# Altium footprint library Connector_SMD.PcbLib: 116 footprints (part 7 of 8)
Each footprint in its own frame and in the unit in brackets; x right, y up, seen from the top. Pads: shape width x height; smd on the part's side, far side on the other; paste and mask are expansions set on the pad; w line width, h text height; cw(c..) or ccw(c..) is an arc to the next point about the centre after c.
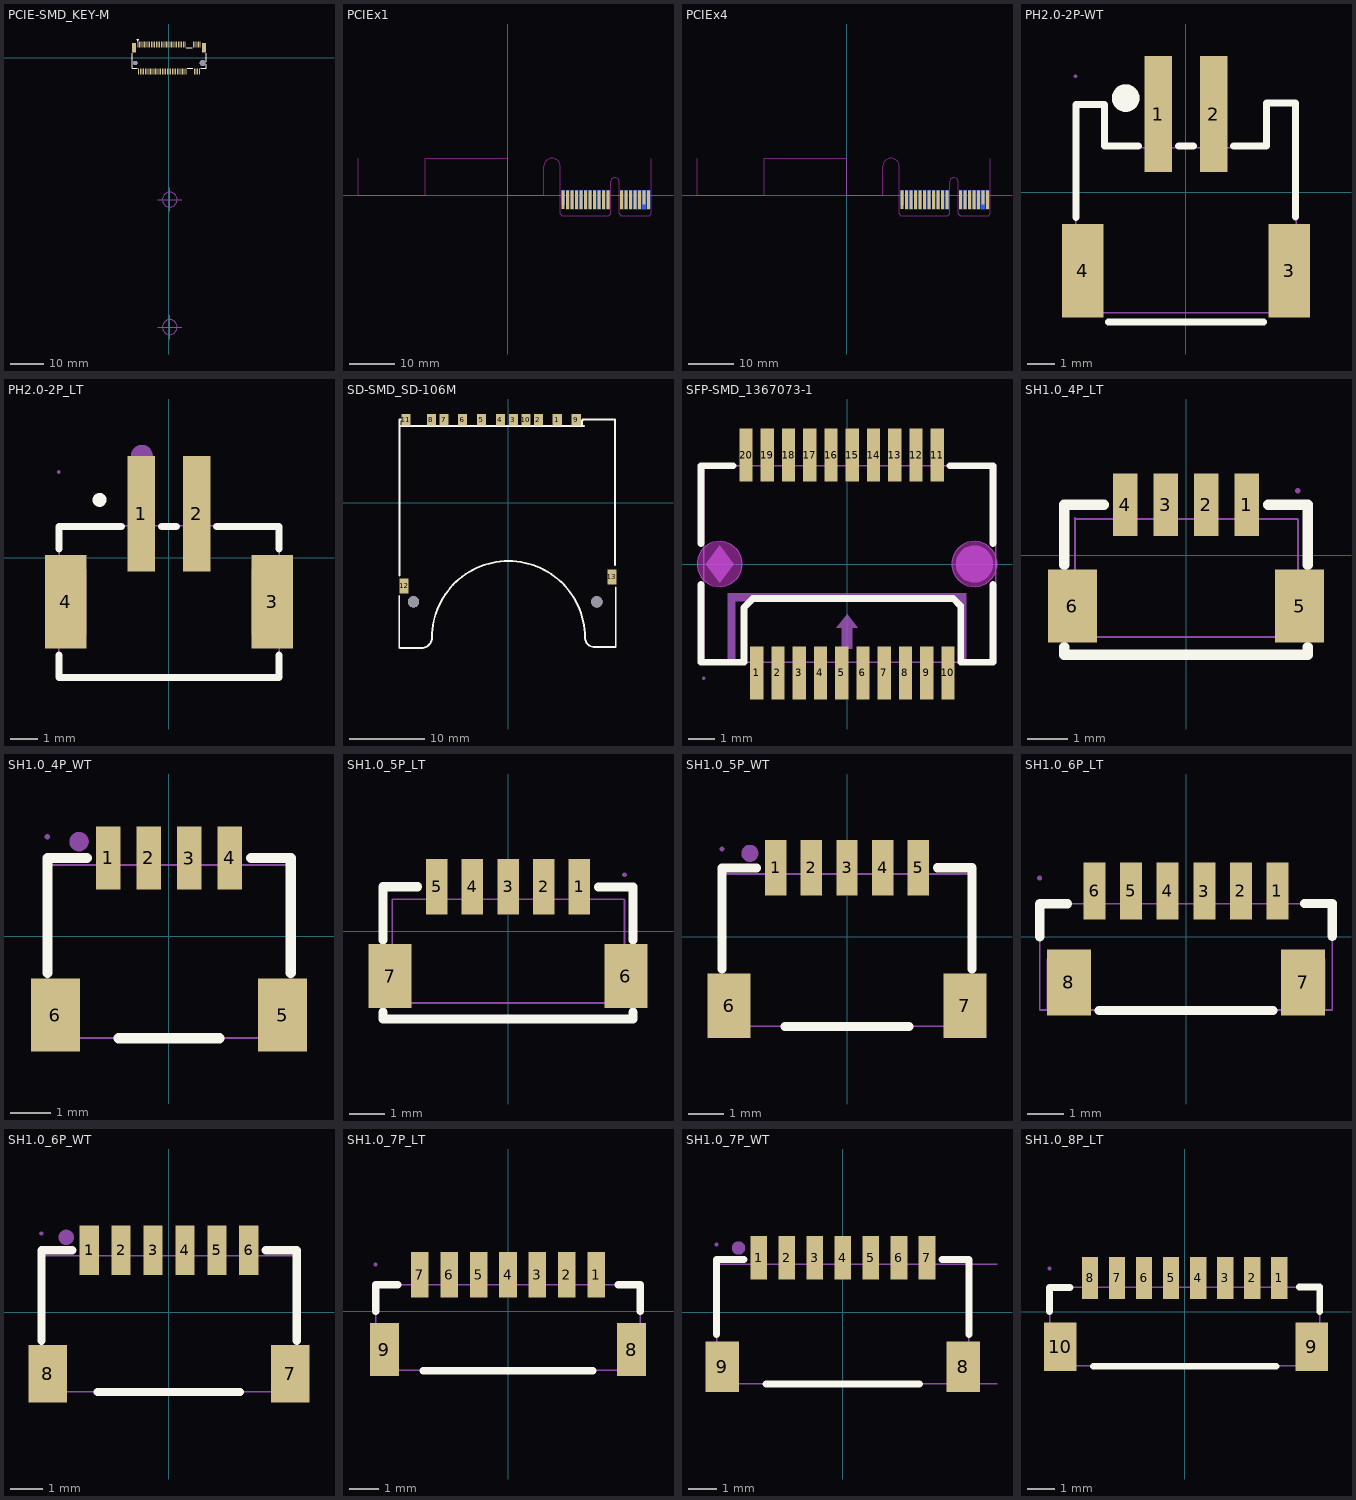
[diagram p6: the footprints below, top view; thin cyan lines are the x and y axes]

## PCIE-SMD_KEY-M [mm]
pads (71):
  rect 0.3x1.8 smd: 1(-9.25,4) 2(-9,-4) 3(-8.75,4) 4(-8.5,-4) 5(-8.25,4) 6(-8,-4) 7(-7.75,4) 8(-7.5,-4) 9(-7.25,4) 10(-7,-4) 11(-6.75,4) 12(-6.5,-4) 13(-6.25,4) 14(-6,-4) 15(-5.75,4) 16(-5.5,-4) 17(-5.25,4) 18(-5,-4) 19(-4.75,4) 20(-4.5,-4) 21(-4.25,4) 22(-4,-4) 23(-3.75,4) 24(-3.5,-4) 25(-3.25,4) 26(-3,-4) 27(-2.75,4) 28(-2.5,-4) 29(-2.25,4) 30(-2,-4) 31(-1.75,4) 32(-1.5,-4) 33(-1.25,4) 34(-1,-4) 35(-0.75,4) 36(-0.5,-4) 37(-0.25,4) 38(0,-4) 39(0.25,4) 40(0.5,-4) 41(0.75,4) 42(1,-4) 43(1.25,4) 44(1.5,-4) 45(1.75,4) 46(2,-4) 47(2.25,4) 48(2.5,-4) 49(2.75,4) 50(3,-4) 51(3.25,4) 52(3.5,-4) 53(3.75,4) 54(4,-4) 55(4.25,4) 56(4.5,-4) 57(4.75,4) 58(5,-4) 67(7.25,4) 68(7.5,-4) 69(7.75,4) 70(8,-4) 71(8.25,4) 72(8.5,-4) 73(8.75,4) 74(9,-4) 75(9.25,4)
  rect 1.2x2.75 smd: SH1(-10.35,3.005) SH2(10.35,3.005)
  round 1.3 hole 1.3 unplated: ""(-10,-1.495)
  round 1.8 hole 1.8 unplated: ""(10,-1.495)
Top Overlay:
  region: -9,5.63 -9.5,5.63 -9.25,4.755
  lines w0.254: -10.95,1.399 -10.95,-3 -9.381,-3 ; 5.131,3 6.869,3 ; 5.381,-3 7.119,-3 ; 9.381,-3 11,-3 11,-1.932 ; 11,-1.058 11,1.404
Mechanical 3:
  circle w0.2: c0.223,-42 r2.209
  circle w0.2: c0.223,-79.838 r2.209
  lines w0.2: -3.298,-79.838 0.223,-79.838 ; -3.298,-42 0.223,-42 ; 0.223,-83.359 0.223,-79.838 ; 0.223,-76.318 0.223,-79.838 ; 0.223,-45.52 0.223,-42 ; 0.223,-38.48 0.223,-42 ; 3.743,-79.838 0.223,-79.838 ; 3.743,-42 0.223,-42
3D body "3D_PCB1_2022-04-16.stp": height 4, standoff -0.6, extent -10.925,-4.075 10.925,4.075

## PCIEx1 [mm]
pads (36):
  rect 0.7x3.2 smd far side mask+0.102: A1(12.3,-0.483)
  rect 0.7x4.2 smd far side mask+0.102: A2(13.3,-0.983) A3(14.3,-0.983) A4(15.3,-0.983) A5(16.3,-0.983) A6(17.3,-0.983) A7(18.3,-0.983) A8(19.3,-0.983) A9(20.3,-0.983) A10(21.3,-0.983) A11(22.3,-0.983) A12(25.3,-0.983) A13(26.3,-0.983) A14(27.3,-0.983) A15(28.3,-0.983) A16(29.3,-0.983) A17(30.3,-0.983) A18(31.3,-0.983)
  rect 0.7x4.2 smd mask+0.102: B1(12.3,-0.983) B2(13.3,-0.983) B3(14.3,-0.983) B4(15.3,-0.983) B5(16.3,-0.983) B6(17.3,-0.983) B7(18.3,-0.983) B8(19.3,-0.983) B9(20.3,-0.983) B10(21.3,-0.983) B11(22.3,-0.983) B12(25.3,-0.983) B13(26.3,-0.983) B14(27.3,-0.983) B15(28.3,-0.983) B16(29.3,-0.983) B18(31.3,-0.983)
  rect 0.7x3.2 smd mask+0.102: B17(30.3,-0.483)
Top Solder:
  region: 11.497,-5.439 32.274,-5.439 32.274,1.267 11.497,1.267
  region: -0.297,-1.019 8.398,-1.019 8.398,2.867 -0.297,2.867
Bottom Solder:
  region: -0.297,-1.019 8.398,-1.019 8.398,2.867 -0.297,2.867
  region: 11.497,-5.439 32.274,-5.439 32.274,1.267 11.497,1.267
Keep-Out Layer:
  lines w0.2: -33.344,0 -33.344,8.25 -33.344,0 ; -33.344,0 -18.344,0 ; -33.344,0 -18.344,0 ; -18.344,0 -18.344,8.25 ; -18.344,0 -18.344,8.25 ; -18.344,8.25 0,8.25 ; -18.344,8.25 0,8.25 ; 0,0 0,8.25 ; 0,0 0,8.25 ; 0,0 8,0 ; 0,0 8,0 ; 8,0 8,6.431 ; 8,0 8,6.431 ; 8,6.431 cw(c9.825,6.431) 11.65,6.431 ; 8,6.431 cw(c9.825,6.431) 11.65,6.431 ; 11.65,-4.132 11.65,6.431 ; 11.65,-4.132 11.65,6.431 ; 11.65,-4.132 12.006,-4.488 11.65,-4.132 ; 22.85,-4.132 22.85,2.97 ; 22.85,-4.132 22.85,2.97 ; 22.85,-4.132 22.494,-4.488 22.85,-4.132 ; 22.85,2.97 cw(c23.8,2.97) 24.75,2.97 ; 22.85,2.97 cw(c23.8,2.97) 24.75,2.97 ; 24.75,-4.129 24.75,2.97 ; 24.75,-4.129 24.75,2.97 ; 24.75,-4.129 25.106,-4.485 24.75,-4.129 ; 31.95,-4.132 31.594,-4.488 31.95,-4.132 ; 31.95,-4.132 31.95,8.118 31.95,-4.132 ; 12.012,-4.5 22.494,-4.5 12.012,-4.5 ; 25.108,-4.5 31.594,-4.5 25.108,-4.5

## PCIEx4 [mm]
pads (36):
  rect 0.7x3.2 smd far side mask+0.102: A1(12.3,-0.483)
  rect 0.7x4.2 smd far side mask+0.102: A2(13.3,-0.983) A3(14.3,-0.983) A4(15.3,-0.983) A5(16.3,-0.983) A6(17.3,-0.983) A7(18.3,-0.983) A8(19.3,-0.983) A9(20.3,-0.983) A10(21.3,-0.983) A11(22.3,-0.983) A12(25.3,-0.983) A13(26.3,-0.983) A14(27.3,-0.983) A15(28.3,-0.983) A16(29.3,-0.983) A17(30.3,-0.983) A18(31.3,-0.983)
  rect 0.7x4.2 smd mask+0.102: B1(12.3,-0.983) B2(13.3,-0.983) B3(14.3,-0.983) B4(15.3,-0.983) B5(16.3,-0.983) B6(17.3,-0.983) B7(18.3,-0.983) B8(19.3,-0.983) B9(20.3,-0.983) B10(21.3,-0.983) B11(22.3,-0.983) B12(25.3,-0.983) B13(26.3,-0.983) B14(27.3,-0.983) B15(28.3,-0.983) B16(29.3,-0.983) B18(31.3,-0.983)
  rect 0.7x3.2 smd mask+0.102: B17(30.3,-0.483)
Top Solder:
  region: 11.497,-5.439 32.274,-5.439 32.274,1.267 11.497,1.267
  region: -0.297,-1.019 8.398,-1.019 8.398,2.867 -0.297,2.867
Bottom Solder:
  region: -0.297,-1.019 8.398,-1.019 8.398,2.867 -0.297,2.867
  region: 11.497,-5.439 32.274,-5.439 32.274,1.267 11.497,1.267
Keep-Out Layer:
  lines w0.2: -33.344,0 -33.344,8.25 -33.344,0 ; -33.344,0 -18.344,0 ; -33.344,0 -18.344,0 ; -18.344,0 -18.344,8.25 ; -18.344,0 -18.344,8.25 ; -18.344,8.25 0,8.25 ; -18.344,8.25 0,8.25 ; 0,0 0,8.25 ; 0,0 0,8.25 ; 0,0 8,0 ; 0,0 8,0 ; 8,0 8,6.431 ; 8,0 8,6.431 ; 8,6.431 cw(c9.825,6.431) 11.65,6.431 ; 8,6.431 cw(c9.825,6.431) 11.65,6.431 ; 11.65,-4.132 11.65,6.431 ; 11.65,-4.132 11.65,6.431 ; 11.65,-4.132 12.006,-4.488 11.65,-4.132 ; 22.85,-4.132 22.85,2.97 ; 22.85,-4.132 22.85,2.97 ; 22.85,-4.132 22.494,-4.488 22.85,-4.132 ; 22.85,2.97 cw(c23.8,2.97) 24.75,2.97 ; 22.85,2.97 cw(c23.8,2.97) 24.75,2.97 ; 24.75,-4.129 24.75,2.97 ; 24.75,-4.129 24.75,2.97 ; 24.75,-4.129 25.106,-4.485 24.75,-4.129 ; 31.95,-4.132 31.594,-4.488 31.95,-4.132 ; 31.95,-4.132 31.95,8.118 31.95,-4.132 ; 12.012,-4.5 22.494,-4.5 12.012,-4.5 ; 25.108,-4.5 31.594,-4.5 25.108,-4.5

## PH2.0-2P-WT [mm]
pads (4):
  rect 1x4.2 smd mask+0.05: 1(-1,2.85) 2(1,2.85)
  rect 1.5x3.4 smd mask+0.05: 3(3.75,-2.85) 4(-3.75,-2.85)
Top Overlay:
  circle w0.5: c-2.191,3.429 r0.25
  lines w0.254: -4,-0.919 -4,2.9 -4,3.2 -3.98,3.2 -2.97,3.2 -2.97,1.68 -1.731,1.68 ; -2.825,-4.7 2.825,-4.7 ; -0.269,1.68 0.269,1.68 ; 1.731,1.68 2.92,1.68 2.92,3.25 3.97,3.25 3.97,-0.896
Mechanical 6:
  circle w0.5: c-2.191,3.429 r0.25
Mechanical 15:
  region: -4,-1.6 -3.5,-1.6 -3.5,-4.1 -4,-4.1
  region: 3.5,-1.6 4,-1.6 4,-4.1 3.5,-4.1
  region: -1.25,4.22 -0.75,4.22 -0.75,1.22 -1.25,1.22
  region: 0.75,4.22 1.25,4.22 1.25,1.22 0.75,1.22
  region: -3.95,4.22 -3.95,4.245 -3.985,4.28 -4.035,4.28 -4.07,4.245 -4.07,4.22 -4.07,4.195 -4.035,4.16 -3.985,4.16 -3.95,4.195 -3.95,4.22
  lines w0.051: -4.01,-4.37 4,-4.37 4,3.23 3,3.23 3,1.63 -3,1.63 -3,3.23 -4,3.23 -4,-4.36 -4.01,-4.37
3D body "CN1.stp": height 5.62, standoff 0, extent -4,-4.374 4.001,4.226

## PH2.0-2P_LT [mm]
pads (4):
  rect 1x4.2 smd paste+0 mask+0.05: 1(-1,1.6) 2(1,1.6)
  rect 1.5x3.4 smd paste+0 mask+0.05: 3(3.75,-1.6) 4(-3.75,-1.6)
Top Overlay:
  circle w0.254: c-2.524,2.108 r0.127
  lines w0.254: -4,-3.531 -4,-4.35 4,-4.35 4,-3.531 ; -4,0.331 -4,1.15 -1.731,1.15 ; -0.269,1.15 0.269,1.15 ; 1.731,1.15 4,1.15 4,0.331
Mechanical 6:
  circle w0.4: c-0.989,3.708 r0.2
Mechanical 15:
  region: -3.943,3.126 -3.943,3.151 -3.979,3.186 -4.028,3.186 -4.063,3.151 -4.063,3.126 -4.063,3.101 -4.028,3.066 -3.979,3.066 -3.943,3.101 -3.943,3.126
  region: -1.25,3.126 -0.75,3.126 -0.75,-0.074 -1.25,-0.074
  region: 0.75,3.126 1.25,3.126 1.25,-0.074 0.75,-0.074
  region: -4.003,-0.4 -3.003,-0.4 -3.003,-2.8 -4.003,-2.8
  region: 3.003,-0.4 4.003,-0.4 4.003,-2.8 3.003,-2.8
  lines w0.051: -4.003,-4.338 4.003,-4.338 4.003,1.161 -3.987,1.161 -4.003,-2.462 -4.003,-4.338
3D body "CN2.stp": height 6.67, standoff 0, extent -4,-4.335 4,3.115

## SD-SMD_SD-106M [mm]
pads (15):
  rect 1.2x1.5 smd: 1(6.505,10.975) 2(4.005,10.975) 3(0.705,10.975) 4(-0.995,10.975) 5(-3.495,10.975) 6(-5.995,10.975) 7(-8.425,10.975) 8(-10.125,10.975) 9(9.005,10.975) 10(2.355,10.975) 11(-13.475,10.975)
  rect 1.2x2 smd: 12(-13.725,-10.975) 13(13.725,-9.775)
  round 1.5 hole 1.5 unplated: ""(-12.475,-13.075) ""(11.725,-13.075)
Top Overlay:
  lines w0.254: -14.351,-19.177 -14.351,-12.319 ; -14.316,-9.599 -14.316,10.975 -14.189,10.975 ; -14.224,-19.177 -11.43,-19.177 ccw(c-11.43,-17.78) -10.033,-17.78 cw(c0.063,-17.78) 10.16,-17.78 ccw(c11.43,-17.78) 11.43,-19.05 14.097,-19.05 ccw(c14.097,-18.923) 14.224,-18.923 14.224,-11.176 ; -14.101,10.16 10.029,10.16 ; 9.779,10.16 9.779,10.795 cw(c9.906,10.795) 9.906,10.922 ; 9.814,10.975 14.132,10.975 14.132,-8.202

## SFP-SMD_1367073-1 [mm]
pads (20):
  rect 0.5x2 smd: 1(-3.4,-4.1) 2(-2.6,-4.1) 3(-1.8,-4.1) 4(-1,-4.1) 5(-0.2,-4.1) 6(0.6,-4.1) 7(1.4,-4.1) 8(2.2,-4.1) 9(3,-4.1) 10(3.8,-4.1) 11(3.4,4.1) 12(2.6,4.1) 13(1.8,4.1) 14(1,4.1) 15(0.2,4.1) 16(-0.6,4.1) 17(-1.4,4.1) 18(-2.2,4.1) 19(-3,4.1) 20(-3.8,4.1)
Top Overlay:
  lines w0.254: -5.5,-0.771 -5.5,-3.7 -3.88,-3.7 -3.88,-1.634 -3.546,-1.3 0.303,-1.3 4.001,-1.3 4.28,-1.58 4.28,-3.701 ; -5.5,0.771 -5.5,3.7 -4.28,3.7 ; 3.882,3.7 5.4,3.7 5.5,3.7 5.5,0.771 ; 4.28,-3.7 5.5,-3.7 5.5,-0.771
Keep-Out Layer:
  board cut-out: -3.949,0 -3.949,-0.112 -4.007,-0.328 -4.119,-0.522 -4.277,-0.68 -4.471,-0.792 -4.687,-0.85 -4.911,-0.85 -5.127,-0.792 -5.321,-0.68 -5.479,-0.522 -5.591,-0.328 -5.649,-0.112 -5.649,0 -5.649,0.112 -5.591,0.328 -5.479,0.522 -5.321,0.68 -5.127,0.792 -4.911,0.85 -4.687,0.85 -4.471,0.792 -4.277,0.68 -4.119,0.522 -4.007,0.328 -3.949,0.112 -3.949,0
  board cut-out: 5.649,0 5.649,-0.112 5.591,-0.328 5.479,-0.522 5.321,-0.68 5.127,-0.792 4.911,-0.85 4.687,-0.85 4.471,-0.792 4.277,-0.68 4.119,-0.522 4.007,-0.328 3.949,-0.112 3.949,0 3.949,0.112 4.007,0.328 4.119,0.522 4.277,0.68 4.471,0.792 4.687,0.85 4.911,0.85 5.127,0.792 5.321,0.68 5.479,0.522 5.591,0.328 5.649,0.112 5.649,0
Keep-Out Layer:
  circle w0.005: c-4.799,0 r0.85
  circle w0.005: c4.799,0 r0.85
  region: -3.949,0 -3.949,-0.112 -4.007,-0.328 -4.119,-0.522 -4.277,-0.68 -4.471,-0.792 -4.687,-0.85 -4.911,-0.85 -5.127,-0.792 -5.321,-0.68 -5.479,-0.522 -5.591,-0.328 -5.649,-0.112 -5.649,0 -5.649,0.112 -5.591,0.328 -5.479,0.522 -5.321,0.68 -5.127,0.792 -4.911,0.85 -4.687,0.85 -4.471,0.792 -4.277,0.68 -4.119,0.522 -4.007,0.328 -3.949,0.112 -3.949,0
  region: 5.649,0 5.649,-0.112 5.591,-0.328 5.479,-0.522 5.321,-0.68 5.127,-0.792 4.911,-0.85 4.687,-0.85 4.471,-0.792 4.277,-0.68 4.119,-0.522 4.007,-0.328 3.949,-0.112 3.949,0 3.949,0.112 4.007,0.328 4.119,0.522 4.277,0.68 4.471,0.792 4.687,0.85 4.911,0.85 5.127,0.792 5.321,0.68 5.479,0.522 5.591,0.328 5.649,0.112 5.649,0
Mechanical 1:
  circle w0.005: c-4.799,0 r0.85
  circle w0.005: c4.799,0 r0.85
Mechanical 6:
  circle w0.7: c4.799,0 r0.35
  region: -4.799,0.7 -5.324,0 -4.799,-0.7 -4.274,0
  region: -4.5,-3.7 -4.5,-1.1 4.5,-1.1 4.5,-3.7 4.2,-3.7 4.2,-1.4 -4.2,-1.4 -4.2,-3.7
  region: 0,-1.9 -0.4,-2.4 -0.2,-2.4 -0.2,-3.2 0.2,-3.2 0.2,-2.4 0.4,-2.4
Mechanical 15:
  region: -5.34,-4.3 -5.34,-4.325 -5.375,-4.36 -5.425,-4.36 -5.46,-4.325 -5.46,-4.3 -5.46,-4.275 -5.425,-4.24 -5.375,-4.24 -5.34,-4.275 -5.34,-4.3
  region: 3.3,4.3 3.5,4.3 3.5,3.3 3.3,3.3
  region: 2.5,4.3 2.7,4.3 2.7,3.3 2.5,3.3
  region: 1.7,4.3 1.9,4.3 1.9,3.3 1.7,3.3
  region: 0.9,4.3 1.1,4.3 1.1,3.3 0.9,3.3
  region: 0.1,4.3 0.3,4.3 0.3,3.3 0.1,3.3
  region: -0.7,4.3 -0.5,4.3 -0.5,3.3 -0.7,3.3
  region: -1.5,4.3 -1.3,4.3 -1.3,3.3 -1.5,3.3
  region: -2.3,4.3 -2.1,4.3 -2.1,3.3 -2.3,3.3
  region: -3.1,4.3 -2.9,4.3 -2.9,3.3 -3.1,3.3
  region: -3.9,4.3 -3.7,4.3 -3.7,3.3 -3.9,3.3
  region: 3.9,-4.3 3.7,-4.3 3.7,-3.3 3.9,-3.3
  region: 3.1,-4.3 2.9,-4.3 2.9,-3.3 3.1,-3.3
  region: 2.3,-4.3 2.1,-4.3 2.1,-3.3 2.3,-3.3
  region: 1.5,-4.3 1.3,-4.3 1.3,-3.3 1.5,-3.3
  region: 0.7,-4.3 0.5,-4.3 0.5,-3.3 0.7,-3.3
  region: -0.1,-4.3 -0.3,-4.3 -0.3,-3.3 -0.1,-3.3
  region: -0.9,-4.3 -1.1,-4.3 -1.1,-3.3 -0.9,-3.3
  region: -1.7,-4.3 -1.9,-4.3 -1.9,-3.3 -1.7,-3.3
  region: -2.5,-4.3 -2.7,-4.3 -2.7,-3.3 -2.5,-3.3
  region: -3.3,-4.3 -3.5,-4.3 -3.5,-3.3 -3.3,-3.3
  lines w0.051: -5.4,-3.7 -5.4,3.7 5.6,3.7 5.6,-3.7 -5.4,-3.7
3D body "CN1.stp": height 5.57, standoff -0.7, extent -5.667,-3.8 5.334,4.2

## SH1.0_4P_LT [mm]
pads (6):
  rect 0.6x1.55 smd paste+0 mask+0.051: 1(1.5,1.251) 2(0.5,1.251) 3(-0.498,1.249) 4(-1.5,1.251)
  rect 1.2x1.8 smd paste+0 mask+0.051: 5(2.8,-1.251) 6(-2.8,-1.251)
Top Overlay:
  lines w0.254: -3.002,-2.264 -3.002,-2.451 3.002,-2.451 3.002,-2.264 ; -3.002,-0.237 -3.002,1.249 -2.031,1.249 ; 2.031,1.249 3.002,1.249 3.002,-0.237
Mechanical 15:
  region: -2.74,-0.751 -2.44,-0.751 -2.44,-1.751 -2.74,-1.751
  region: 2.46,-0.751 2.76,-0.751 2.76,-1.751 2.46,-1.751
  region: 1.4,1.59 1.6,1.59 1.6,0.74 1.4,0.74
  region: 0.4,1.59 0.6,1.59 0.6,0.74 0.4,0.74
  region: -0.598,1.59 -0.398,1.59 -0.398,0.74 -0.598,0.74
  region: -1.6,1.59 -1.4,1.59 -1.4,0.74 -1.6,0.74
  region: 2.82,1.59 2.82,1.615 2.785,1.65 2.735,1.65 2.7,1.615 2.7,1.59 2.7,1.565 2.735,1.53 2.785,1.53 2.82,1.565 2.82,1.59
  lines w0.051: -2.74,-2.01 -2.73,-2.01 2.76,-2.02 2.76,0.88 2.74,0.9 -2.72,0.9 -2.74,0.92 -2.74,-1.98 -2.74,-2.01
3D body "CN1.stp": height 4.51, standoff 0, extent -3.05,-2.012 3.05,1.588

## SH1.0_4P_WT [mm]
pads (6):
  rect 0.6x1.55 smd paste+0 mask+0.051: 1(-1.499,1.938) 2(-0.499,1.938) 3(0.503,1.935) 4(1.502,1.936)
  rect 1.2x1.8 smd paste+0 mask+0.051: 5(2.8,-1.938) 6(-2.8,-1.938)
Top Overlay:
  lines w0.254: -2.998,-0.9 -2.998,1.934 -2.031,1.934 ; -1.237,-2.508 1.237,-2.508 ; 2.032,1.935 3.002,1.935 3.002,-0.901
Mechanical 6:
  circle w0.24: c-2.219,2.339 r0.12
Mechanical 15:
  region: 2.702,-1.439 2.902,-1.439 2.902,-2.439 2.702,-2.439
  region: -2.9,-1.438 -2.7,-1.438 -2.7,-2.438 -2.9,-2.438
  region: -1.399,1.659 -1.599,1.659 -1.599,2.459 -1.399,2.459
  region: -0.399,1.659 -0.599,1.659 -0.599,2.459 -0.399,2.459
  region: 0.603,1.659 0.403,1.659 0.403,2.459 0.603,2.459
  region: 1.602,1.659 1.402,1.659 1.402,2.459 1.602,2.459
  region: -2.939,2.459 -2.939,2.484 -2.974,2.519 -3.024,2.519 -3.059,2.484 -3.059,2.459 -3.059,2.434 -3.024,2.399 -2.974,2.399 -2.939,2.434 -2.939,2.459
  lines w0.051: -2.999,-2.501 3.001,-2.501 3.001,1.759 -2.999,1.759 -2.999,-2.501
3D body "4P WT.step": height 3.15, standoff 0, extent -3.18,-2.949 3.18,2.101

## SH1.0_5P_LT [mm]
pads (7):
  rect 0.6x1.55 smd paste+0 mask+0.051: 1(2.001,1.25) 2(1.002,1.25) 3(0.004,1.249) 4(-0.999,1.25) 5(-2.001,1.252)
  rect 1.2x1.8 smd paste+0 mask+0.051: 6(3.301,-1.252) 7(-3.301,-1.25)
Top Overlay:
  lines w0.254: -3.503,-2.451 3.503,-2.451 ; -3.503,-2.45 -3.503,-2.263 ; -3.503,-0.236 -3.503,1.25 -2.532,1.25 ; 2.532,1.249 3.503,1.249 3.503,-0.238 ; 3.503,-2.451 3.503,-2.265
Mechanical 15:
  region: -3.241,-0.752 -2.941,-0.752 -2.941,-1.752 -3.241,-1.752
  region: -2.101,1.589 -1.901,1.589 -1.901,0.739 -2.101,0.739
  region: 2.961,-0.752 3.261,-0.752 3.261,-1.752 2.961,-1.752
  region: 1.901,1.589 2.101,1.589 2.101,0.739 1.901,0.739
  region: 0.902,1.589 1.102,1.589 1.102,0.739 0.902,0.739
  region: -0.096,1.589 0.104,1.589 0.104,0.739 -0.096,0.739
  region: -1.099,1.589 -0.899,1.589 -0.899,0.739 -1.099,0.739
  region: 3.321,1.589 3.321,1.614 3.286,1.649 3.236,1.649 3.201,1.614 3.201,1.589 3.201,1.564 3.236,1.529 3.286,1.529 3.321,1.564 3.321,1.589
  lines w0.051: 3.261,-2.021 3.261,0.879 3.241,0.899 -3.241,0.899 -3.241,-2.001 3.261,-2.001
3D body "5P LT.step": height 4.26, standoff 0, extent -3.5,-1.955 3.5,1.655

## SH1.0_5P_WT [mm]
pads (7):
  rect 0.6x1.55 smd paste+0 mask+0.051: 1(-2,1.934) 2(-1,1.934) 3(0,1.931) 4(1,1.932) 5(2,1.933)
  rect 1.2x1.8 smd paste+0 mask+0.051: 6(-3.3,-1.934) 7(3.3,-1.934)
Top Overlay:
  lines w0.254: -3.497,-0.904 -3.497,1.93 -2.53,1.93 ; -1.736,-2.512 1.736,-2.512 ; 2.532,1.932 3.503,1.932 3.503,-0.904
Mechanical 6:
  circle w0.24: c-2.719,2.335 r0.12
Mechanical 15:
  region: 1.103,1.655 0.903,1.655 0.903,2.455 1.103,2.455
  region: 3.205,-1.443 3.405,-1.443 3.405,-2.443 3.205,-2.443
  region: 2.106,1.655 1.906,1.655 1.906,2.455 2.106,2.455
  region: -3.4,-1.442 -3.2,-1.442 -3.2,-2.442 -3.4,-2.442
  region: -1.899,1.655 -2.099,1.655 -2.099,2.455 -1.899,2.455
  region: -0.899,1.655 -1.099,1.655 -1.099,2.455 -0.899,2.455
  region: 0.104,1.655 -0.096,1.655 -0.096,2.455 0.104,2.455
  region: -3.439,2.455 -3.439,2.48 -3.474,2.515 -3.524,2.515 -3.559,2.48 -3.559,2.455 -3.559,2.43 -3.524,2.395 -3.474,2.395 -3.439,2.43 -3.439,2.455
  lines w0.051: -3.499,-2.505 3.501,-2.505 3.501,1.755 -3.499,1.755 -3.499,-2.505
3D body "SMD_5P-P1.00_XUNPU_WAFER-SH1.0-5PWB.step": height 3.2, standoff 0, extent -3.68,-2.808 3.68,2.242

## SH1.0_6P_LT [mm]
pads (8):
  rect 0.6x1.55 smd paste+0 mask+0.051: 1(2.499,1.251) 2(1.499,1.251) 3(0.501,1.249) 4(-0.501,1.251) 5(-1.501,1.251) 6(-2.501,1.251)
  rect 1.2x1.8 smd paste+0 mask+0.051: 7(3.201,-1.251) 8(-3.201,-1.251)
Top Overlay:
  lines w0.254: -4,0 -4,0.9 -3.24,0.9 ; -2.38,-2.02 2.38,-2.02 ; 3.241,0.911 4.001,0.911 4.001,0.011
Mechanical 15:
  region: -3.801,-0.6 -3.001,-0.6 -3.001,-2 -3.801,-2
  region: 3.001,-0.6 3.801,-0.6 3.801,-2 3.001,-2
  region: 2.399,1.6 2.599,1.6 2.599,0.85 2.399,0.85
  region: 1.399,1.6 1.599,1.6 1.599,0.85 1.399,0.85
  region: 0.401,1.6 0.601,1.6 0.601,0.85 0.401,0.85
  region: -0.601,1.6 -0.401,1.6 -0.401,0.85 -0.601,0.85
  region: -1.601,1.6 -1.401,1.6 -1.401,0.85 -1.601,0.85
  region: -2.601,1.6 -2.401,1.6 -2.401,0.85 -2.601,0.85
  region: -3.94,1.6 -3.94,1.625 -3.975,1.66 -4.025,1.66 -4.06,1.625 -4.06,1.6 -4.06,1.575 -4.025,1.54 -3.975,1.54 -3.94,1.575 -3.94,1.6
  lines w0.051: -4,-2 -4,0.9 4,0.9 4,-2 -4,-2
3D body "CN1.stp": height 4.51, standoff 0, extent -3.75,-2.112 3.75,1.488

## SH1.0_6P_WT [mm]
pads (8):
  rect 0.6x1.55 smd paste+0 mask+0.051: 1(-2.5,1.939) 2(-1.5,1.939) 3(-0.498,1.936) 4(0.501,1.937) 5(1.502,1.937) 6(2.502,1.937)
  rect 1.2x1.8 smd paste+0 mask+0.051: 7(3.801,-1.939) 8(-3.801,-1.937)
Top Overlay:
  lines w0.254: -3.998,-0.899 -3.998,1.935 -3.032,1.935 ; -2.238,-2.507 2.222,-2.507 ; 3.033,1.935 4.003,1.935 4.003,-0.902
Mechanical 6:
  circle w0.24: c-3.22,2.34 r0.12
Mechanical 15:
  region: -3.94,2.46 -3.94,2.485 -3.975,2.52 -4.025,2.52 -4.06,2.485 -4.06,2.46 -4.06,2.435 -4.025,2.4 -3.975,2.4 -3.94,2.435 -3.94,2.46
  region: 2.602,1.66 2.402,1.66 2.402,2.46 2.602,2.46
  region: 1.602,1.66 1.402,1.66 1.402,2.46 1.602,2.46
  region: 0.601,1.66 0.401,1.66 0.401,2.46 0.601,2.46
  region: -0.398,1.66 -0.598,1.66 -0.598,2.46 -0.398,2.46
  region: -1.4,1.66 -1.6,1.66 -1.6,2.46 -1.4,2.46
  region: -2.4,1.66 -2.6,1.66 -2.6,2.46 -2.4,2.46
  region: 3.701,-1.439 3.901,-1.439 3.901,-2.439 3.701,-2.439
  region: -3.901,-1.437 -3.701,-1.437 -3.701,-2.437 -3.901,-2.437
  lines w0.051: -4,-2.5 -4,1.76 4,1.76 4,-2.5 -4,-2.5
3D body "CN1.stp": height 2.45, standoff 0, extent -3.748,-2.587 3.752,2.413

## SH1.0_7P_LT [mm]
pads (9):
  rect 0.6x1.55 smd paste+0 mask+0.051: 1(3,1.251) 2(2,1.251) 3(1,1.249) 4(0,1.251) 5(-1,1.251) 6(-2,1.251) 7(-3,1.251)
  rect 1x1.8 smd paste+0 mask+0.051: 8(4.2,-1.3) 9(-4.2,-1.3)
Top Overlay:
  lines w0.254: -4.5,0 -4.5,0.9 -3.74,0.9 ; -2.88,-2.02 2.88,-2.02 ; 3.741,0.911 4.501,0.911 4.501,0.011
Mechanical 15:
  region: 3.801,-0.6 4.601,-0.6 4.601,-2 3.801,-2
  region: -4.601,-0.6 -3.801,-0.6 -3.801,-2 -4.601,-2
  region: -2.101,1.6 -1.901,1.6 -1.901,0.85 -2.101,0.85
  region: -1.099,1.6 -0.899,1.6 -0.899,0.85 -1.099,0.85
  region: -0.101,1.6 0.099,1.6 0.099,0.85 -0.101,0.85
  region: 0.901,1.6 1.101,1.6 1.101,0.85 0.901,0.85
  region: 1.899,1.6 2.099,1.6 2.099,0.85 1.899,0.85
  region: 2.899,1.6 3.099,1.6 3.099,0.85 2.899,0.85
  region: -4.44,1.6 -4.44,1.625 -4.475,1.66 -4.525,1.66 -4.56,1.625 -4.56,1.6 -4.56,1.575 -4.525,1.54 -4.475,1.54 -4.44,1.575 -4.44,1.6
  region: -3.101,1.6 -2.901,1.6 -2.901,0.85 -3.101,0.85
  lines w0.051: -4.5,-2 4.5,-2 4.5,0.9 -4.5,0.9 -4.5,-2
3D body "7P LT.step": height 4.4, standoff 0, extent -4.65,-2.227 4.651,1.533

## SH1.0_7P_WT [mm]
pads (9):
  rect 0.6x1.55 smd paste+0 mask+0.051: 1(-3,1.95) 2(-2,1.95) 3(-1,1.95) 4(0,1.95) 5(1,1.95) 6(2,1.95) 7(3,1.95)
  rect 1.2x1.8 smd paste+0 mask+0.051: 8(4.3,-1.95) 9(-4.3,-1.95)
Top Overlay:
  lines w0.254: -4.499,-0.8 -4.499,1.885 -3.533,1.885 ; -2.739,-2.557 2.739,-2.557 ; 3.534,1.884 4.504,1.884 4.504,-0.8
Mechanical 6:
  circle w0.24: c-3.721,2.291 r0.12
Mechanical 15:
  region: 1.101,1.611 0.901,1.611 0.901,2.411 1.101,2.411
  region: 2.101,1.611 1.901,1.611 1.901,2.411 2.101,2.411
  region: -4.402,-1.486 -4.202,-1.486 -4.202,-2.486 -4.402,-2.486
  region: -2.901,1.611 -3.101,1.611 -3.101,2.411 -2.901,2.411
  region: -1.901,1.611 -2.101,1.611 -2.101,2.411 -1.901,2.411
  region: -0.898,1.611 -1.098,1.611 -1.098,2.411 -0.898,2.411
  region: 0.101,1.611 -0.099,1.611 -0.099,2.411 0.101,2.411
  region: -4.441,2.411 -4.441,2.435 -4.476,2.471 -4.526,2.471 -4.561,2.435 -4.561,2.411 -4.561,2.386 -4.526,2.351 -4.476,2.351 -4.441,2.386 -4.441,2.411
  region: 4.202,-1.489 4.402,-1.489 4.402,-2.489 4.202,-2.489
  region: 3.103,1.609 2.903,1.609 2.903,2.409 3.103,2.409
  lines w0.051: 4.501,-2.551 4.501,1.709 ; 5.5,-2.549 -4.501,-2.549 -4.501,1.711 5.5,1.711
3D body "7P WT.step": height 3.14, standoff 0, extent -4.68,-2.965 4.68,2.085

## SH1.0_8P_LT [mm]
pads (10):
  rect 0.6x1.55 smd paste+0 mask+0.051: 1(3.5,1.251) 2(2.5,1.251) 3(1.5,1.249) 4(0.5,1.251) 5(-0.5,1.251) 6(-1.5,1.251) 7(-2.5,1.251) 8(-3.5,1.251)
  rect 1.2x1.8 smd paste+0 mask+0.051: 9(4.7,-1.3) 10(-4.6,-1.3)
Top Overlay:
  lines w0.254: -5,0 -5,0.9 -4.24,0.9 ; -3.38,-2.02 3.38,-2.02 ; 4.241,0.911 5.001,0.911 5.001,0.011
Mechanical 15:
  region: 4.301,-0.6 5.101,-0.6 5.101,-2 4.301,-2
  region: -5.101,-0.6 -4.301,-0.6 -4.301,-2 -5.101,-2
  region: 3.399,1.6 3.599,1.6 3.599,0.85 3.399,0.85
  region: 2.399,1.6 2.599,1.6 2.599,0.85 2.399,0.85
  region: -2.601,1.6 -2.401,1.6 -2.401,0.85 -2.601,0.85
  region: -3.601,1.6 -3.401,1.6 -3.401,0.85 -3.601,0.85
  region: -4.94,1.6 -4.94,1.625 -4.975,1.66 -5.025,1.66 -5.06,1.625 -5.06,1.6 -5.06,1.575 -5.025,1.54 -4.975,1.54 -4.94,1.575 -4.94,1.6
  region: 1.401,1.6 1.601,1.6 1.601,0.85 1.401,0.85
  region: 0.399,1.6 0.599,1.6 0.599,0.85 0.399,0.85
  region: -0.599,1.6 -0.399,1.6 -0.399,0.85 -0.599,0.85
  region: -1.601,1.6 -1.401,1.6 -1.401,0.85 -1.601,0.85
  lines w0.051: -5,-2 5,-2 5,0.9 -5,0.9 -5,-2
3D body "8PLT.step": height 4.42, standoff 0, extent -5.175,-2.044 5.175,1.706